# Altium footprint library 放电二极管.PcbLib: 1 footprints
Each footprint in its own frame and in the unit in brackets; x right, y up, seen from the top. Pads: shape width x height; smd on the part's side, far side on the other; paste and mask are expansions set on the pad; w line width, h text height; cw(c..) or ccw(c..) is an arc to the next point about the centre after c.
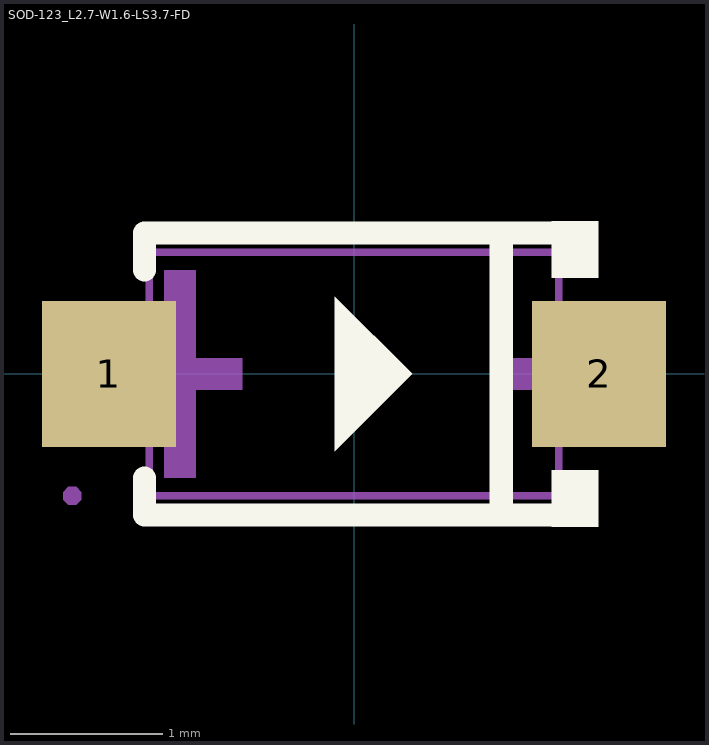
[diagram p0: the footprint, top view; thin cyan lines are the x and y axes]

## SOD-123_L2.7-W1.6-LS3.7-FD [mm]
pads (2):
  rect 0.88x0.96 smd: 1(-1.61,0) 2(1.61,0)
Top Overlay:
  region: 0.381,0 -0.127,0.508 -0.127,-0.508
  region: 1.3,1.002 1.3,0.632 1.605,0.632 1.605,1.002
  region: 1.3,-1.003 1.3,-0.632 1.605,-0.633 1.605,-1.003
  lines w0.152: -1.376,-0.683 -1.376,-0.926 1.376,-0.926 ; -1.376,0.683 -1.376,0.926 1.376,0.926 ; 0.967,-0.926 0.967,0.926
Mechanical 2:
  region: -1.245,-0.68 -1.245,0.68 -1.041,0.68 -1.041,-0.68
  region: -1.551,-0.102 -1.551,0.102 -0.735,0.102 -0.735,-0.102
  region: 1.805,-0.102 1.805,0.102 0.989,0.102 0.989,-0.102
Mechanical 6:
  lines w0.051: -1.345,-0.8 -1.345,0.8 1.345,0.8 1.345,-0.8 -1.345,-0.8
Mechanical 7:
  region: -1.511,0.3 -1.511,-0.3 -1.34,-0.3 -1.34,0.3
  region: 1.511,-0.3 1.511,0.3 1.34,0.3 1.34,-0.3
Mechanical 8:
  region: -1.791,-0.8 -1.791,-0.825 -1.826,-0.86 -1.876,-0.86 -1.911,-0.825 -1.911,-0.8 -1.911,-0.775 -1.876,-0.74 -1.826,-0.74 -1.791,-0.775 -1.791,-0.8
Mechanical 9:
  region: -1.851,0.3 -1.501,0.3 -1.501,-0.3 -1.851,-0.3
  region: 1.851,-0.3 1.501,-0.3 1.501,0.3 1.851,0.3